# Altium footprint library chipfc_libs.PCBLIB: 315 footprints (part 6 of 20)
Each footprint in its own frame and in the unit in brackets; x right, y up, seen from the top. Pads: shape width x height; smd on the part's side, far side on the other; paste and mask are expansions set on the pad; w line width, h text height; cw(c..) or ccw(c..) is an arc to the next point about the centre after c.
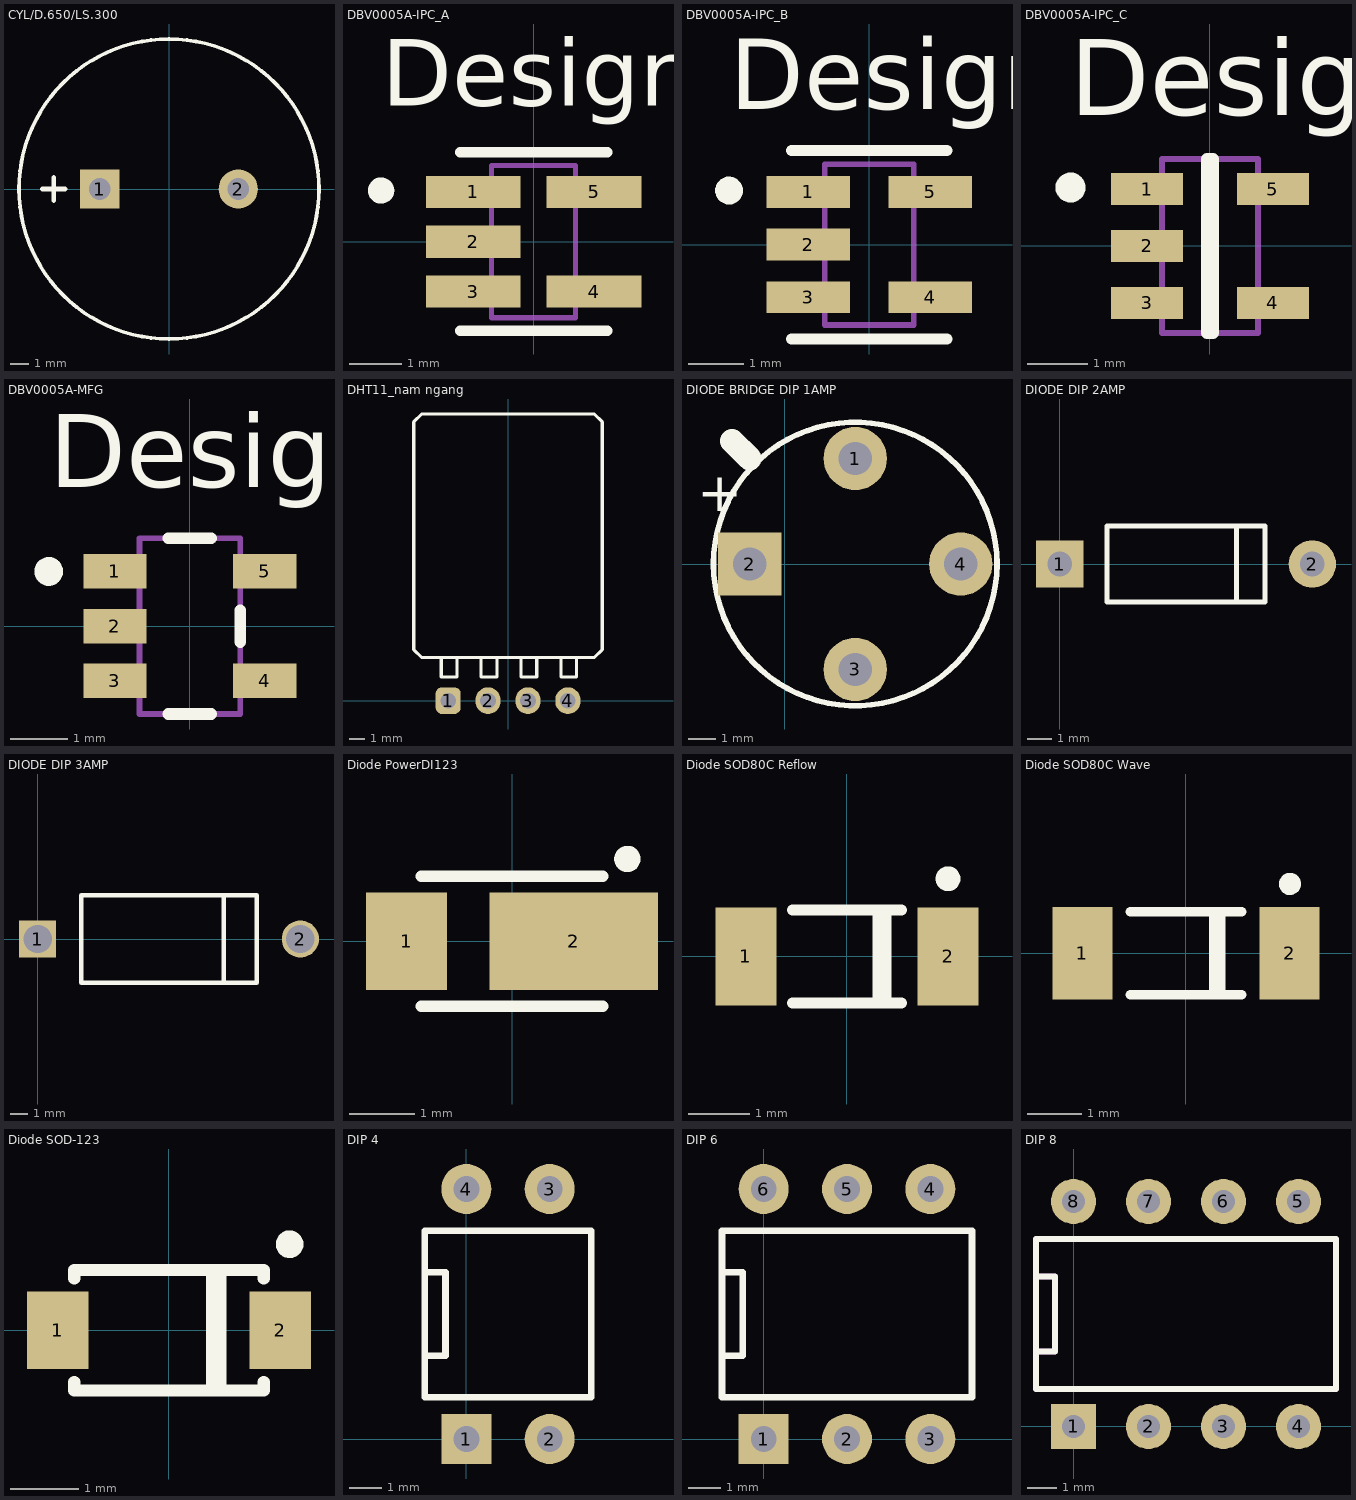
[diagram p5: the footprints below, top view; thin cyan lines are the x and y axes]

## CYL/D.650/LS.300 [mil]
pads (2):
  rect 85x85 hole 47.24: 1(-150,0)
  round 85 hole 47.24: 2(150,0)
Top Overlay:
  circle w8: c0,0 r325
  lines w10: -275,0 -225,0 ; -250,-25 -250,25
3D body "User Library-CE_R300_D650_H1000.step": height 1000, standoff -137.8, extent -324.13,-324.03 324.8,324.04

## DBV0005A-IPC_A [mm]
pads (5):
  rect 1.805x0.612 smd paste+0 mask+0: 1(-1.15,0.95) 2(-1.15,0) 3(-1.15,-0.95) 4(1.15,-0.95) 5(1.15,0.95)
Top Overlay:
  circle w0.25: c-2.903,0.975 r0.125
  lines w0.2: -1.4,-1.7 1.4,-1.7 ; -1.4,1.7 1.4,1.7
  text "Designator414" at -2.896,2.591 h1.27
Mechanical 13:
  lines w0.1: -0.8,-1.45 0.8,-1.45 0.8,1.45 -0.8,1.45 -0.8,-1.45
3D body "DBV0005A.stp": height 1.2, standoff 0, extent -1.4,-1.45 1.4,1.45

## DBV0005A-IPC_B [mm]
pads (5):
  rect 1.505x0.572 smd paste+0 mask+0: 1(-1.1,0.95) 2(-1.1,0) 3(-1.1,-0.95) 4(1.1,-0.95) 5(1.1,0.95)
Top Overlay:
  circle w0.25: c-2.528,0.975 r0.125
  lines w0.2: -1.4,-1.7 1.4,-1.7 ; -1.4,1.7 1.4,1.7
  text "Designator413" at -2.513,2.438 h1.27
Mechanical 13:
  lines w0.1: -0.8,-1.45 0.8,-1.45 0.8,1.45 -0.8,1.45 -0.8,-1.45
3D body "DBV0005A.stp": height 1.2, standoff 0, extent -1.4,-1.45 1.4,1.45

## DBV0005A-IPC_C [mm]
pads (5):
  rect 1.205x0.532 smd paste+0 mask+0: 1(-1.05,0.95) 2(-1.05,0) 3(-1.05,-0.95) 4(1.05,-0.95) 5(1.05,0.95)
Top Overlay:
  circle w0.25: c-2.328,0.975 r0.125
  lines w0.2: -0.052,-1.45 0.052,-1.45 0.052,1.45 -0.052,1.45 -0.052,-1.45
  text "Designator412" at -2.337,2.184 h1.27
Mechanical 13:
  lines w0.1: -0.8,-1.45 -0.8,1.45 0.8,1.45 0.8,-1.45 -0.8,-1.45
3D body "DBV0005A.stp": height 1.2, standoff 0, extent -1.4,-1.45 1.4,1.45

## DBV0005A-MFG [mm]
pads (5):
  rect 1.1x0.6 smd paste+0 mask+0: 1(-1.3,0.95) 2(-1.3,0) 3(-1.3,-0.95) 4(1.3,-0.95) 5(1.3,0.95)
Top Overlay:
  circle w0.25: c-2.45,0.95 r0.125
  lines w0.2: -0.375,-1.525 0.375,-1.525 ; -0.375,1.525 0.375,1.525 ; 0.875,-0.275 0.875,0.275
  text "Designator411" at -2.438,2.413 h1.27
Mechanical 13:
  lines w0.1: -0.875,-1.525 -0.875,1.525 0.875,1.525 0.875,-1.525 -0.875,-1.525
3D body "DBV0005A.stp": height 1.2, standoff 0, extent -1.4,-1.45 1.4,1.45

## DHT11_nam ngang [mm] "Cam bien do am va nhiet do"
height 5.5
pads (4):
  rrect50% 1.6x1.7 hole 1: 1(-3.81,0)
  oval 1.6x1.7 hole 1: 2(-1.27,0) 3(1.27,0) 4(3.81,0)
Top Overlay:
  lines w0.2: -4.25,2.75 -4.25,1.5 -3.25,1.5 -3.25,2.75 ; -1.71,2.75 -1.71,1.5 -0.71,1.5 -0.71,2.75 ; 0.83,2.75 0.83,1.5 1.83,1.5 1.83,2.75 ; 3.37,2.75 3.37,1.5 4.37,1.5 4.37,2.75 ; -6,3.25 -5.5,2.75 5.5,2.75 6,3.25 6,17.75 5.5,18.25 -5.5,18.25 -6,17.75 -6,3.25
3D body "User Library-DHT11-right.step": height 5.5, standoff -2.6, extent -6,-0.4 6,18.1

## DIODE BRIDGE DIP 1AMP [mil]
pads (4):
  round 90 hole 47.23: 1(100,150)
  rect 90x90 hole 47.23: 2(-50,0)
  round 90 hole 47: 3(100,-150) 4(250,0)
Top Overlay:
  circle w8: c100,0 r201.56
  lines w34: -75,175 -50,150 -62.5,162.5
  text "+" at -125,75 h56.25

## DIODE DIP 2AMP [mil]
pads (2):
  rect 75x75 hole 39: 1(0,0)
  round 75 hole 39: 2(400,0)
Top Overlay:
  lines w8: 280,-60 280,60 ; 75,-60 325,-60 325,60 75,60 75,-60

## DIODE DIP 3AMP [mil]
pads (2):
  rect 85x85 hole 65: 1(0,0)
  round 85 hole 65: 2(600,0)
Top Overlay:
  lines w10: 425,-100 425,100 ; 100,-100 500,-100 500,100 100,100 100,-100

## Diode PowerDI123 [mm]
pads (2):
  rect 1.25x1.5 smd: 1(-1.625,0)
  rect 2.6x1.5 smd: 2(0.95,0)
Top Overlay:
  circle w0.203: c1.778,1.27 r0.102
  lines w0.178: -1.397,-1 1.397,-1 ; -1.397,1 1.397,1
3D body "User Library-POWERDI-123.STEP": height 1, standoff 0, extent -1.95,-0.965 1.95,0.965

## Diode SOD80C Reflow [mm]
pads (2):
  rect 1x1.6 smd: 1(-1.65,0) 2(1.65,0)
Top Overlay:
  circle w0.203: c1.651,1.27 r0.102
  lines w0.178: -0.889,-0.762 0.889,-0.762 ; -0.889,0.762 0.889,0.762 ; 0.508,-0.762 0.508,0.762 ; 0.635,-0.762 0.635,0.762
3D body "User Library-sod80-1-mini-melf-LL4148.step": height 1.44, standoff -0.01, extent -1.75,-0.725 1.75,0.725

## Diode SOD80C Wave [mm]
pads (2):
  rect 1.1x1.7 smd: 1(-1.9,0) 2(1.9,0)
Top Overlay:
  circle w0.203: c1.905,1.27 r0.102
  lines w0.178: -1.016,-0.762 1.016,-0.762 ; -1.016,0.762 1.016,0.762 ; 0.508,-0.762 0.508,0.762 ; 0.635,-0.762 0.635,0.762
3D body "User Library-sod80-1-mini-melf-LL4148.step": height 1.44, standoff -0.01, extent -1.75,-0.725 1.75,0.725

## Diode SOD-123 [mm]
pads (2):
  rect 0.91x1.143 smd: 1(-1.64,0) 2(1.64,0)
Top Overlay:
  circle w0.203: c1.778,1.27 r0.102
  lines w0.178: -1.397,-0.762 -1.397,-0.889 1.397,-0.889 1.397,-0.762 ; -1.397,0.762 -1.397,0.889 1.397,0.889 1.397,0.762 ; 0.635,-0.889 0.635,0.889 ; 0.762,-0.889 0.762,0.889
3D body "User Library-SOD-123 CASE 425-04.STEP": height 1.2, standoff 0, extent -1.65,-0.8 1.65,0.8

## DIP 4 [mil] "DIP IC (2.54mm), 4 pins"
pads (4):
  rect 60x60 / inner round 60 / far side rect 60x80 hole 31: 1(0,0)
  round 60 / inner round 60 / far side oval 60x80 hole 31: 2(100,0) 3(100,300) 4(0,300)
Top Overlay:
  lines w8: -50,100 -25,100 -25,200 -50,200 ; -50,50 150,50 150,250 -50,250 -50,50

## DIP 6 [mil] "DIP IC (2.54mm), 6 pins"
pads (6):
  rect 60x60 / inner round 60 / far side rect 60x80 hole 31: 1(0,0)
  round 60 / inner round 60 / far side oval 60x80 hole 31: 2(100,0) 3(200,0) 4(200,300) 5(100,300) 6(0,300)
Top Overlay:
  lines w8: -50,100 -25,100 -25,200 -50,200 ; -50,50 -50,250 250,250 250,50 -50,50
3D body "User Library-DIP6-White.STEP": height 208.66, standoff -78.74, extent -40,-4.92 240.31,304.92

## DIP 8 [mil] "DIP IC (2.54mm), 8 pins"
pads (8):
  rect 60x60 / inner round 60 / far side rect 60x80 hole 31: 1(0,0)
  round 60 / inner round 60 / far side oval 60x80 hole 31: 2(100,0) 3(200,0) 4(300,0) 5(300,300) 6(200,300) 7(100,300) 8(0,300)
Top Overlay:
  lines w8: -50,100 -25,100 -25,200 -50,200 ; -50,50 -50,250 350,250 350,50 -50,50
Mechanical 1:
  lines w8: -50,100 -25,100 -25,200 -50,200 ; -50,50 -50,250 350,250 350,50 -50,50
3D body "User Library-PDIP-8.step": height 200.79, standoff -125.2, extent -46.85,-15.2 346.85,310